# Altium footprint library final_complete_merge.PcbLib: 106 footprints (part 7 of 7)
Each footprint in its own frame and in the unit in brackets; x right, y up, seen from the top. Pads: shape width x height; smd on the part's side, far side on the other; paste and mask are expansions set on the pad; w line width, h text height; cw(c..) or ccw(c..) is an arc to the next point about the centre after c.
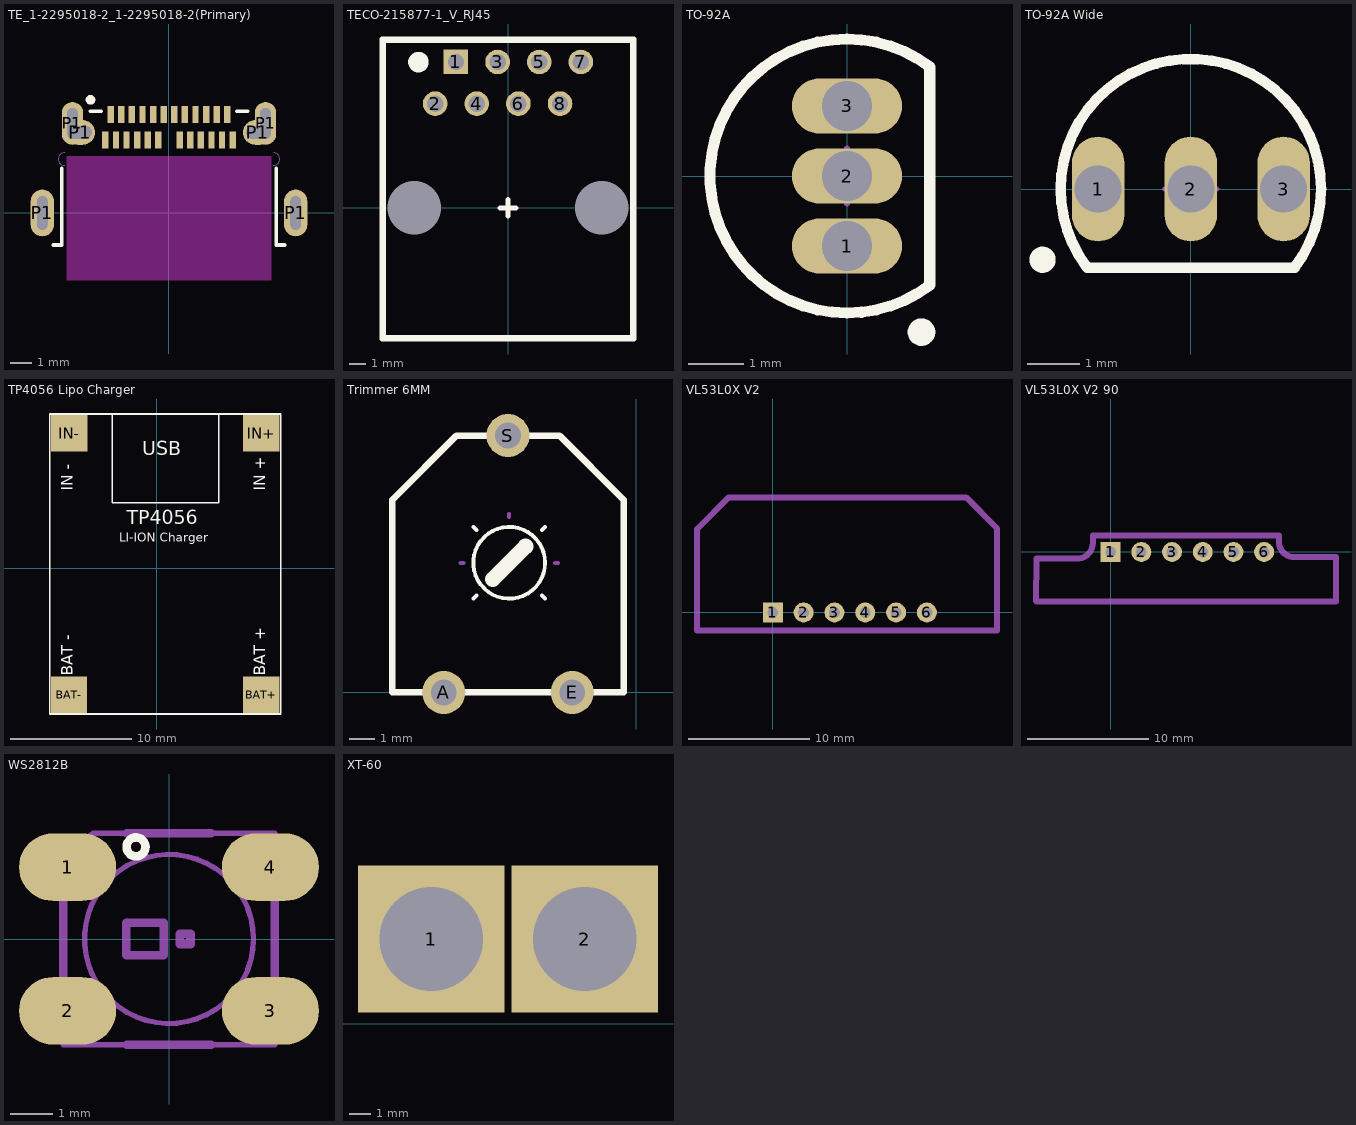
[diagram p6: the footprints below, top view; thin cyan lines are the x and y axes]

## TE_1-2295018-2_1-2295018-2(Primary) [mm]
pads (30):
  rect 0.3x0.8 smd: A1(-2.75,4.63) A2(-2.25,4.63) A3(-1.75,4.63) A4(-1.25,4.63) A5(-0.75,4.63) A6(-0.25,4.63) A7(0.25,4.63) A8(0.75,4.63) A9(1.25,4.63) A10(1.75,4.63) A11(2.25,4.63) A12(2.75,4.63) B1(3,3.43) B2(2.5,3.43) B3(2,3.43) B4(1.5,3.43) B5(1,3.43) B6(0.5,3.43) B7(-0.5,3.43) B8(-1,3.43) B9(-1.5,3.43) B10(-2,3.43) B11(-2.5,3.43) B12(-3,3.43)
  oval 1.1x2.2 hole 0.5 slot 1.6 at 90 deg: P1(-5.97,0) P1(5.97,0)
  oval 1.008x2.016 hole 0.5 slot 1.45 at 90 deg: P1(-4.55,4.22) P1(4.55,4.22)
  oval 1.4x1.165 hole 0.6 slot 1.1 at 0 deg: P1(-4.191,3.795) P1(4.191,3.795)
Top Overlay:
  circle w0.25: c-3.7,5.334 r0.1
  lines w0.178: -5.45,-1.504 -5.05,-1.504 -5.05,2.1 ; -3.7,4.795 -3.2,4.795 ; 3.2,4.795 3.7,4.795 ; 5.05,2.1 5.05,-1.504 5.45,-1.504
Bottom Overlay:
  lines w0.178: -4.92,-1.27 -4.9,4.795 ; -4.9,-1.27 -4.9,4.795 ; 4.9,-1.27 4.9,4.795 ; 4.919,-1.27 4.9,4.795 ; -4.9,4.795 4.9,4.795 ; -4.9,4.795 4.9,4.795
Keep-Out Layer:
  board cut-out: -4.826,-3.175 -4.826,2.667 4.826,2.667 4.826,-3.175
Mechanical 1:
  lines w0: -6.22,-0.55 ccw(c-5.97,-0.55) -5.97,-0.8 ccw(c-5.97,-0.55) -5.72,-0.55 ; -6.22,0.55 cw(c-5.97,0.55) -5.97,0.8 cw(c-5.97,0.55) -5.72,0.55 ; -4.92,2.24 cw(c-4.92,2.54) -5.22,2.54 cw(c-4.92,2.54) -4.92,2.84 ; -4.8,3.745 ccw(c-4.55,3.745) -4.55,3.495 ; -4.8,4.695 cw(c-4.55,4.695) -4.55,4.945 cw(c-4.55,4.695) -4.3,4.695 ; -4.3,4.25 ccw(c-4.15,4.245) -4.155,4.095 ; -4.002,4.095 cw(c-4.002,3.792) -3.7,3.792 ; -4,3.495 ccw(c-4,3.795) -3.7,3.795 ; 4,3.495 cw(c4,3.795) 3.7,3.795 cw(c4,3.795) 4,4.095 ; 4.155,4.095 ccw(c4.15,4.245) 4.3,4.25 ; 4.3,4.695 cw(c4.55,4.695) 4.55,4.945 cw(c4.55,4.695) 4.8,4.695 ; 4.55,3.495 ccw(c4.55,3.745) 4.8,3.745 ; 4.919,2.24 ccw(c4.929,2.531) 5.22,2.541 ; 4.93,2.84 cw(c4.925,2.545) 5.22,2.54 ; 5.72,-0.55 ccw(c5.97,-0.55) 5.97,-0.8 ccw(c5.97,-0.55) 6.22,-0.55 ; 5.72,0.55 cw(c5.97,0.55) 5.97,0.8 cw(c5.97,0.55) 6.22,0.55
  lines w0.178: -6.22,-0.55 -6.22,0.55 ; -5.72,-0.55 -5.72,0.55 ; -4.8,3.745 -4.8,4.695 ; -4.55,3.495 -4,3.495 ; -4.3,4.25 -4.3,4.695 ; -4.155,4.095 -4.005,4.095 ; 4,3.495 4.55,3.495 ; 4,4.095 4.155,4.095 ; 4.3,4.25 4.3,4.695 ; 4.8,3.745 4.8,4.695 ; 5.72,-0.55 5.72,0.55 ; 6.22,-0.55 6.22,0.55
3D body "1-2295018-2--3DModel-STEP-56544.STEP": height 2.43, standoff -1.17, extent -6.07,-3.147 6.07,4.953

## TECO-215877-1_V_RJ45 [mm] "TH, 8-Leads, Body 18.1x15.2mm RJ45"
height 11.5
pads (10):
  rect 1.5x1.5 hole 1: 1(-3.175,8.9)
  round 1.5 hole 1: 2(-4.445,6.36) 3(-0.635,8.9) 4(-1.905,6.36) 5(1.905,8.9) 6(0.635,6.36) 7(4.445,8.9) 8(3.175,6.36)
  rect 0x0 hole 3.25 unplated: ""(-5.715,0) ""(5.715,0)
Top Overlay:
  circle w1: c-5.461,8.89 r0.125
  lines w0.3: -0.5,0 0.5,0 ; 0,-0.5 0,0.5 ; -7.6,-7.9 -7.6,10.2 ; -7.6,-7.9 7.6,-7.9 ; -7.6,-7.9 -7.6,10.2 ; -7.6,-7.9 7.6,-7.9 ; -7.6,10.2 7.6,10.2 ; -7.6,10.2 7.6,10.2 ; 7.6,-7.9 7.6,10.2 ; 7.6,-7.9 7.6,10.2 ; -7.7,-8 -7.7,10.3 7.7,10.3 7.7,-8 -7.7,-8
3D body "c-215877-1-p-3d.stp": height 11.55, standoff -3.15, extent -7.59,-7.91 7.61,10.19

## TO-92A [mm] "TO, Flat Index; 3 In-Line, Axial Leads; Body Dia. 4.5mm; Leads 0.51 x 0.48 mm (max)"
height 6.86
pads (3):
  oval 2x1 hole 0.9: 1(0,-1.27) 2(0,0) 3(0,1.27)
Top Overlay:
  circle w0.25: c1.35,-2.83 r0.125
  lines w0.2: 1.5,-1.98 cw(c0,0) 1.5,1.98 1.5,-1.98
Mechanical 13:
  lines w0.1: 1.5,-1.98 cw(c0,0) 1.5,1.98 1.5,-1.98
Mechanical 15:
  lines w0.1: -0.5,0 0.5,0 ; 0,-0.5 0,0.5
3D body: height 6.86, standoff 2.2, extent -2.485,-2.495 1.501,2.495

## TO-92A Wide [mm] "TO, Flat Index; 3 In-Line, Axial Leads; Body Dia. 4.5mm; Leads 0.51 x 0.48 mm (max)"
height 6.86
pads (3):
  oval 1x2 hole 0.9: 1(-1.77,0) 2(0,0) 3(1.77,0)
Top Overlay:
  circle w0.25: c-2.83,-1.35 r0.125
  lines w0.2: -1.98,-1.5 cw(c0,0) 1.98,-1.5 -1.98,-1.5
Mechanical 13:
  lines w0.1: -1.98,-1.5 cw(c0,0) 1.98,-1.5 -1.98,-1.5
Mechanical 15:
  lines w0.1: -0.5,0 0.5,0 ; 0,-0.5 0,0.5
3D body: height 6.86, standoff 2.2, extent -2.495,-1.501 2.495,2.485

## TP4056 Lipo Charger [mm]
pads (4):
  rect 3x3 smd: BAT+(8.623,-10.452) BAT-(-7.252,-10.452) IN+(8.616,11.13) IN-(-7.244,11.13)
Top Overlay:
  lines w0.127: -3.688,12.705 -3.688,5.39 5.09,5.39 5.09,12.705 ; -8.832,-12.032 10.211,-12.032 10.211,12.725 -8.832,12.725 -8.832,-12.032
  text "USB" at -1.219,8.915 h1.97
  text "TP4056" at -2.489,3.2 h1.97
  text "IN -" at -6.617,6.375 h1.57
  text "IN +" at 9.258,6.375 h1.57
  text "BAT -" at -6.617,-8.865 h1.57
  text "BAT +" at 9.258,-8.865 h1.57
  text "LI-ION Charger" at -3.124,1.93 h1.26
3D body "5V-1A.sldprt": height 3.69, standoff 0, extent -7.84,-9.995 9.16,13.005

## Trimmer 6MM [mm]
pads (3):
  round 1.676 hole 1: A(-7.5,0) E(-2.5,0) S(-5,10)
Top Overlay:
  circle w0.152: c-4.953,5.047 r1.397
  lines w0.152: -6.35,3.65 -6.223,3.777 ; -6.35,6.444 -6.223,6.317 ; -3.683,3.777 -3.556,3.65 ; -3.683,6.317 -3.556,6.444
  lines w0.254: -9.5,0 -0.5,0 -0.5,6 -0.5,7.5 -3,10 -5,10 -7,10 -9.5,7.5 -9.5,6 -9.5,0
  lines w0.61: -5.588,4.412 -4.318,5.682
Mechanical 16:
  lines w0.152: -6.858,5.047 -6.731,5.047 ; -4.953,6.825 -4.953,6.952 ; -3.175,5.047 -3.048,5.047
3D body "3319p.stp": height 6.55, standoff -3.79, extent -9.5,-0.647 -0.508,10.706

## VL53L0X V2 [mil] "ToF sensor"
pads (6):
  rect 65x65 hole 35: 1(0,0)
  round 65 hole 35: 2(100,0) 3(200,0) 4(300,0) 5(400,0) 6(500,0)
Mechanical 3:
  lines w19.68: -246.06,-57.87 -246.06,270.47 -143.31,373.23 627.17,373.23 727.56,272.83 727.56,-58.66 -245.28,-58.66 -246.06,-57.87
3D body "zl201-3_p2-54_l7-62_w2-54_h8-89.stp": height 110.16, standoff -359.84, extent 250,-50 550,50
3D body "zl201-3_p2-54_l7-62_w2-54_h8-89.stp": height 110.16, standoff -359.84, extent -50,-50 250,50
3D body "vl53l0x.stp": height 196.85, standoff 59.06, extent -245.12,-59.54 727.32,373.53

## VL53L0X V2 90 [mil] "ToF sensor"
pads (6):
  rect 65x65 hole 35: 1(0,0)
  round 65 hole 35: 2(100,0) 3(200,0) 4(300,0) 5(400,0) 6(500,0)
Mechanical 3:
  lines w19.68: -243.31,-160.24 -241.73,-21.26 -108.27,-21.26 ccw(c-108.27,28.74) -58.27,28.74 -58.27,53.15 548.03,53.15 548.03,33.46 ccw(c598.03,33.46) 598.03,-16.54 734.25,-16.54 734.25,-161.81 -242.13,-161.81
3D body "vl53l0x.stp": height 492.13, standoff 59.06, extent -241.73,-157.63 730.71,-19.84
3D body "zl201-3_p2-54_l7-62_w2-54_h8-89.stp": height 110.16, standoff -359.84, extent 250.39,-49.22 550.39,50.78
3D body "zl201-3_p2-54_l7-62_w2-54_h8-89.stp": height 110.16, standoff -359.84, extent -49.61,-49.22 250.39,50.78

## WS2812B [mm]
pads (4):
  rrect100% 2.3x1.6 smd: 1(-2.4,1.7) 2(-2.4,-1.7) 3(2.4,-1.7) 4(2.4,1.7)
Top Overlay:
  circle w0.203: c-0.78,2.18 r0.224
Mechanical 3:
  circle w0.127: c0,0 r2
  region: 1.7,1.15 1.7,2.05 2.7,2.05 2.7,1.15
  region: 1.7,-2.05 1.7,-1.15 2.7,-1.15 2.7,-2.05
  region: -1.7,2.05 -1.7,1.15 -2.7,1.15 -2.7,2.05
  region: -1.7,-1.15 -1.7,-2.05 -2.7,-2.05 -2.7,-1.15
  lines w0.127: -2.5,-2.5 -2.5,2 -1.8,2.5 2.5,2.5 2.5,-2.5 -2.5,-2.5
Mechanical 7:
  lines w0.203: -2.5,-0.9 -2.5,0.9 ; -1,-2.5 1,-2.5 ; -1,2.5 1,2.5 ; 2.5,-0.9 2.5,0.9 ; -1.016,-0.381 -1.016,0.381 -0.127,0.381 -0.127,-0.381 -1.016,-0.381 ; 0.254,-0.127 0.254,0.127 0.508,0.127 0.508,-0.127 0.254,-0.127
3D body "WS2812_RGB_LED_updated.stp": height 1.5, standoff -0.2, extent -2.67,-2.475 2.68,2.475

## XT-60 [mm] "Battery Connector"
pads (2):
  rect 7x7 hole 4.95: 1(4.394,4.039) 2(11.709,4.039)
3D body "XT60 Stecker.stp": height 16.4, standoff -5, extent 0.074,0.128 15.674,8.128